# Altium schematic symbol library WR-TBL_Pluggable Connector.SchLib: 879 symbols (part 9 of 15)
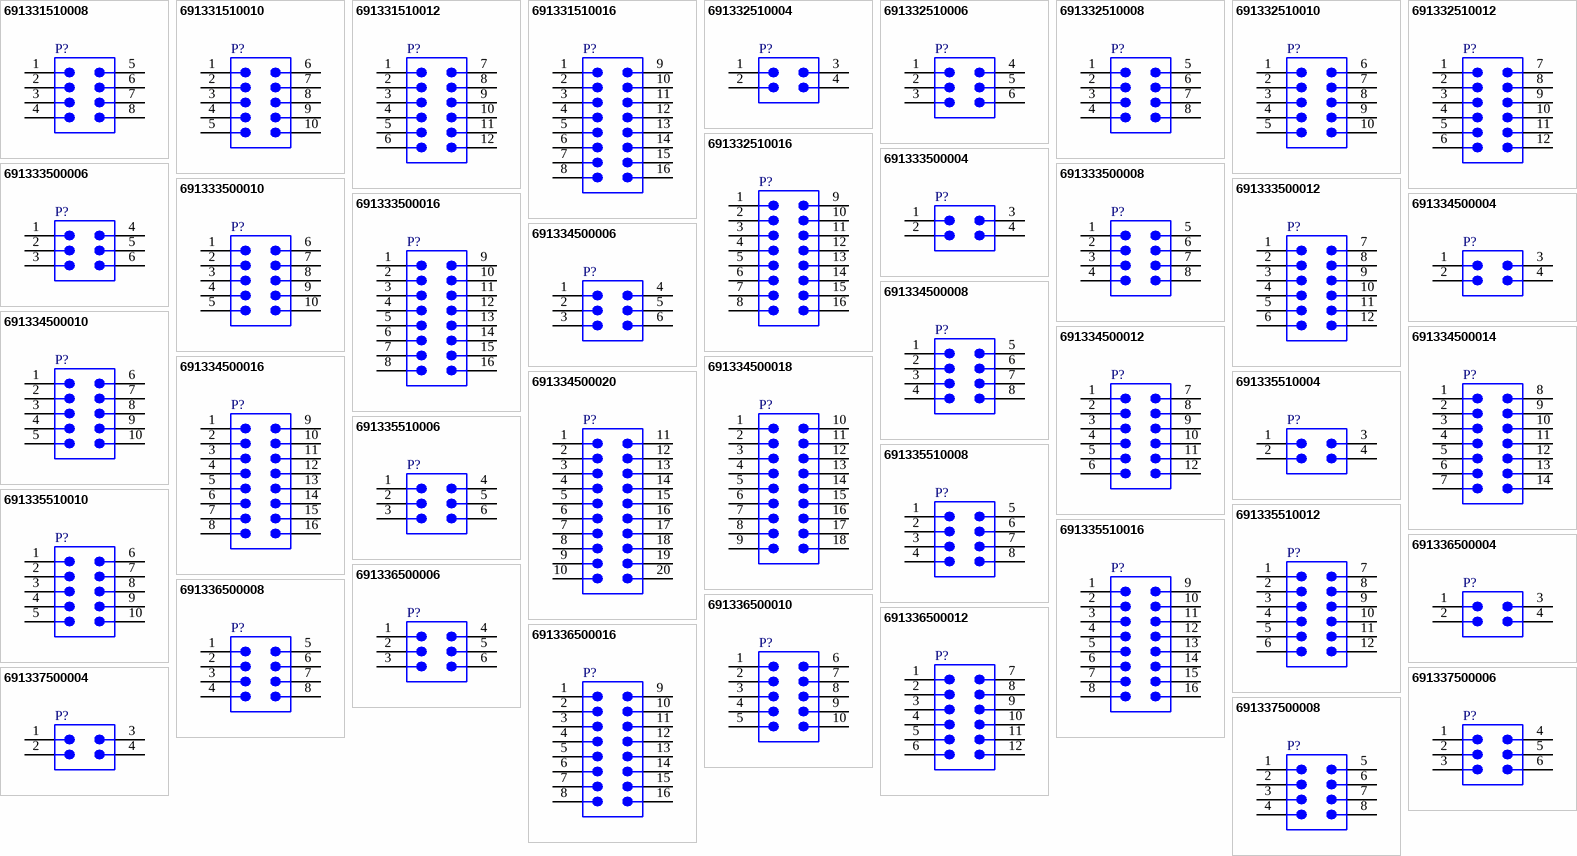
[diagram p29: symbols 691331510008 to 691337500008]

## 691335510012
designator P?  (value not drawn)
WR-TBL Series 3355 Double Level Horizontal PCB Header Modular, THT, pitch 5.08mm, 12p; Manufacturer: Wurth Elektronik; Modularity: Yes; Rated Current: 10A; Working Voltage: 300V (AC); Manufacturer Part Number: 691335510012; Product Series: WR-TBL; ComponentLink1Description: Website Link; ComponentLink1URL: https://www.we-online.com; ComponentLink2Description: Datasheet Link; ComponentLink2URL: https://www.we-online.com/components/products/datasheet/691335510012; Mount: Through Hole; Operating Temperature Min: -40degC; Operating Temperature Max: 105degC; Packaging: Box; Application: Pluggable; Number of Pins: 12; Number of Rows: 2; Orientation: Double Level Horizontal; Lead Pitch: 5.08mm
footprint 691335510012
pins: 1, 2, 3, 4, 5, 6, 7, 8, 9, 10, 11, 12

## 691335510016
designator P?  (value not drawn)
WR-TBL Series 3355 Double Level Horizontal PCB Header Modular, THT, pitch 5.08mm, 16p; Manufacturer: Wurth Elektronik; Modularity: Yes; Rated Current: 10A; Working Voltage: 300V (AC); Manufacturer Part Number: 691335510016; Product Series: WR-TBL; ComponentLink1Description: Website Link; ComponentLink1URL: https://www.we-online.com; ComponentLink2Description: Datasheet Link; ComponentLink2URL: https://www.we-online.com/components/products/datasheet/691335510016; Mount: Through Hole; Operating Temperature Min: -40degC; Operating Temperature Max: 105degC; Packaging: Box; Application: Pluggable; Number of Pins: 16; Number of Rows: 2; Orientation: Double Level Horizontal; Lead Pitch: 5.08mm
footprint 691335510016
pins: 1, 2, 3, 4, 5, 6, 7, 8, 9, 10, 11, 12, 13, 14, 15, 16

## 691336500004
designator P?  (value not drawn)
WR-TBL Series 3365 Double Level Vertical Header with Flanges, THT, pitch 5.08mm, 04p; Manufacturer: Wurth Elektronik; Modularity: No; Rated Current: 15A; Working Voltage: 300V (AC); Manufacturer Part Number: 691336500004; Product Series: WR-TBL; ComponentLink1Description: Website Link; ComponentLink1URL: https://www.we-online.com; ComponentLink2Description: Datasheet Link; ComponentLink2URL: https://www.we-online.com/components/products/datasheet/691336500004; Mount: Through Hole; Operating Temperature Min: -40degC; Operating Temperature Max: 105degC; Packaging: Box; Application: Pluggable; Number of Pins: 4; Number of Rows: 2; Orientation: Double Level Vertical; Lead Pitch: 5.08mm
footprint 691336500004
pins: 1, 2, 3, 4

## 691336500006
designator P?  (value not drawn)
WR-TBL Series 3365 Double Level Vertical Header with Flanges, THT, pitch 5.08mm, 06p; Manufacturer: Wurth Elektronik; Modularity: No; Rated Current: 15A; Working Voltage: 300V (AC); Manufacturer Part Number: 691336500006; Product Series: WR-TBL; ComponentLink1Description: Website Link; ComponentLink1URL: https://www.we-online.com; ComponentLink2Description: Datasheet Link; ComponentLink2URL: https://www.we-online.com/components/products/datasheet/691336500006; Mount: Through Hole; Operating Temperature Min: -40degC; Operating Temperature Max: 105degC; Packaging: Box; Application: Pluggable; Number of Pins: 6; Number of Rows: 2; Orientation: Double Level Vertical; Lead Pitch: 5.08mm
footprint 691336500006
pins: 1, 2, 3, 4, 5, 6

## 691336500008
designator P?  (value not drawn)
WR-TBL Series 3365 Double Level Vertical Header with Flanges, THT, pitch 5.08mm, 08p; Manufacturer: Wurth Elektronik; Modularity: No; Rated Current: 15A; Working Voltage: 300V (AC); Manufacturer Part Number: 691336500008; Product Series: WR-TBL; ComponentLink1Description: Website Link; ComponentLink1URL: https://www.we-online.com; ComponentLink2Description: Datasheet Link; ComponentLink2URL: https://www.we-online.com/components/products/datasheet/691336500008; Mount: Through Hole; Operating Temperature Min: -40degC; Operating Temperature Max: 105degC; Packaging: Box; Application: Pluggable; Number of Pins: 8; Number of Rows: 2; Orientation: Double Level Vertical; Lead Pitch: 5.08mm
footprint 691336500008
pins: 1, 2, 3, 4, 5, 6, 7, 8

## 691336500010
designator P?  (value not drawn)
WR-TBL Series 3365 Double Level Vertical Header with Flanges, THT, pitch 5.08mm, 10p; Manufacturer: Wurth Elektronik; Modularity: No; Rated Current: 15A; Working Voltage: 300V (AC); Manufacturer Part Number: 691336500010; Product Series: WR-TBL; ComponentLink1Description: Website Link; ComponentLink1URL: https://www.we-online.com; ComponentLink2Description: Datasheet Link; ComponentLink2URL: https://www.we-online.com/components/products/datasheet/691336500010; Mount: Through Hole; Operating Temperature Min: -40degC; Operating Temperature Max: 105degC; Packaging: Box; Application: Pluggable; Number of Pins: 10; Number of Rows: 2; Orientation: Double Level Vertical; Lead Pitch: 5.08mm
footprint 691336500010
pins: 1, 2, 3, 4, 5, 6, 7, 8, 9, 10

## 691336500012
designator P?  (value not drawn)
WR-TBL Series 3365 Double Level Vertical Header with Flanges, THT, pitch 5.08mm, 12p; Manufacturer: Wurth Elektronik; Modularity: No; Rated Current: 15A; Working Voltage: 300V (AC); Manufacturer Part Number: 691336500012; Product Series: WR-TBL; ComponentLink1Description: Website Link; ComponentLink1URL: https://www.we-online.com; ComponentLink2Description: Datasheet Link; ComponentLink2URL: https://www.we-online.com/components/products/datasheet/691336500012; Mount: Through Hole; Operating Temperature Min: -40degC; Operating Temperature Max: 105degC; Packaging: Box; Application: Pluggable; Number of Pins: 12; Number of Rows: 2; Orientation: Double Level Vertical; Lead Pitch: 5.08mm
footprint 691336500012
pins: 1, 2, 3, 4, 5, 6, 7, 8, 9, 10, 11, 12

## 691336500016
designator P?  (value not drawn)
WR-TBL Series 3365 Double Level Vertical Header with Flanges, THT, pitch 5.08mm, 16p; Manufacturer: Wurth Elektronik; Modularity: No; Rated Current: 15A; Working Voltage: 300V (AC); Manufacturer Part Number: 691336500016; Product Series: WR-TBL; ComponentLink1Description: Website Link; ComponentLink1URL: https://www.we-online.com; ComponentLink2Description: Datasheet Link; ComponentLink2URL: https://www.we-online.com/components/products/datasheet/691336500016; Mount: Through Hole; Operating Temperature Min: -40degC; Operating Temperature Max: 105degC; Packaging: Box; Application: Pluggable; Number of Pins: 16; Number of Rows: 2; Orientation: Double Level Vertical; Lead Pitch: 5.08mm
footprint 691336500016
pins: 1, 2, 3, 4, 5, 6, 7, 8, 9, 10, 11, 12, 13, 14, 15, 16

## 691337500004
designator P?  (value not drawn)
WR-TBL Series 3375 Double Level Vertical PCB Header with Flanges & Nut Type, THT, pitch 5.08mm, 04p; Manufacturer: Wurth Elektronik; Modularity: No; Rated Current: 10A; Working Voltage: 300V (AC); Manufacturer Part Number: 691337500004; Product Series: WR-TBL; ComponentLink1Description: Website Link; ComponentLink1URL: https://www.we-online.com; ComponentLink2Description: Datasheet Link; ComponentLink2URL: https://www.we-online.com/components/products/datasheet/691337500004; Mount: Through Hole; Operating Temperature Min: -40degC; Operating Temperature Max: 105degC; Packaging: Box; Application: Pluggable; Number of Pins: 4; Number of Rows: 2; Orientation: Double Level Vertical; Lead Pitch: 5.08mm
footprint 691337500004
pins: 1, 2, 3, 4

## 691337500006
designator P?  (value not drawn)
WR-TBL Series 3375 Double Level Vertical PCB Header with Flanges & Nut Type, THT, pitch 5.08mm, 06p; Manufacturer: Wurth Elektronik; Modularity: No; Rated Current: 10A; Working Voltage: 300V (AC); Manufacturer Part Number: 691337500006; Product Series: WR-TBL; ComponentLink1Description: Website Link; ComponentLink1URL: https://www.we-online.com; ComponentLink2Description: Datasheet Link; ComponentLink2URL: https://www.we-online.com/components/products/datasheet/691337500006; Mount: Through Hole; Operating Temperature Min: -40degC; Operating Temperature Max: 105degC; Packaging: Box; Application: Pluggable; Number of Pins: 6; Number of Rows: 2; Orientation: Double Level Vertical; Lead Pitch: 5.08mm
footprint 691337500006
pins: 1, 2, 3, 4, 5, 6

## 691337500008
designator P?  (value not drawn)
WR-TBL Series 3375 Double Level Vertical PCB Header with Flanges & Nut Type, THT, pitch 5.08mm, 08p; Manufacturer: Wurth Elektronik; Modularity: No; Rated Current: 10A; Working Voltage: 300V (AC); Manufacturer Part Number: 691337500008; Product Series: WR-TBL; ComponentLink1Description: Website Link; ComponentLink1URL: https://www.we-online.com; ComponentLink2Description: Datasheet Link; ComponentLink2URL: https://www.we-online.com/components/products/datasheet/691337500008; Mount: Through Hole; Operating Temperature Min: -40degC; Operating Temperature Max: 105degC; Packaging: Box; Application: Pluggable; Number of Pins: 8; Number of Rows: 2; Orientation: Double Level Vertical; Lead Pitch: 5.08mm
footprint 691337500008
pins: 1, 2, 3, 4, 5, 6, 7, 8

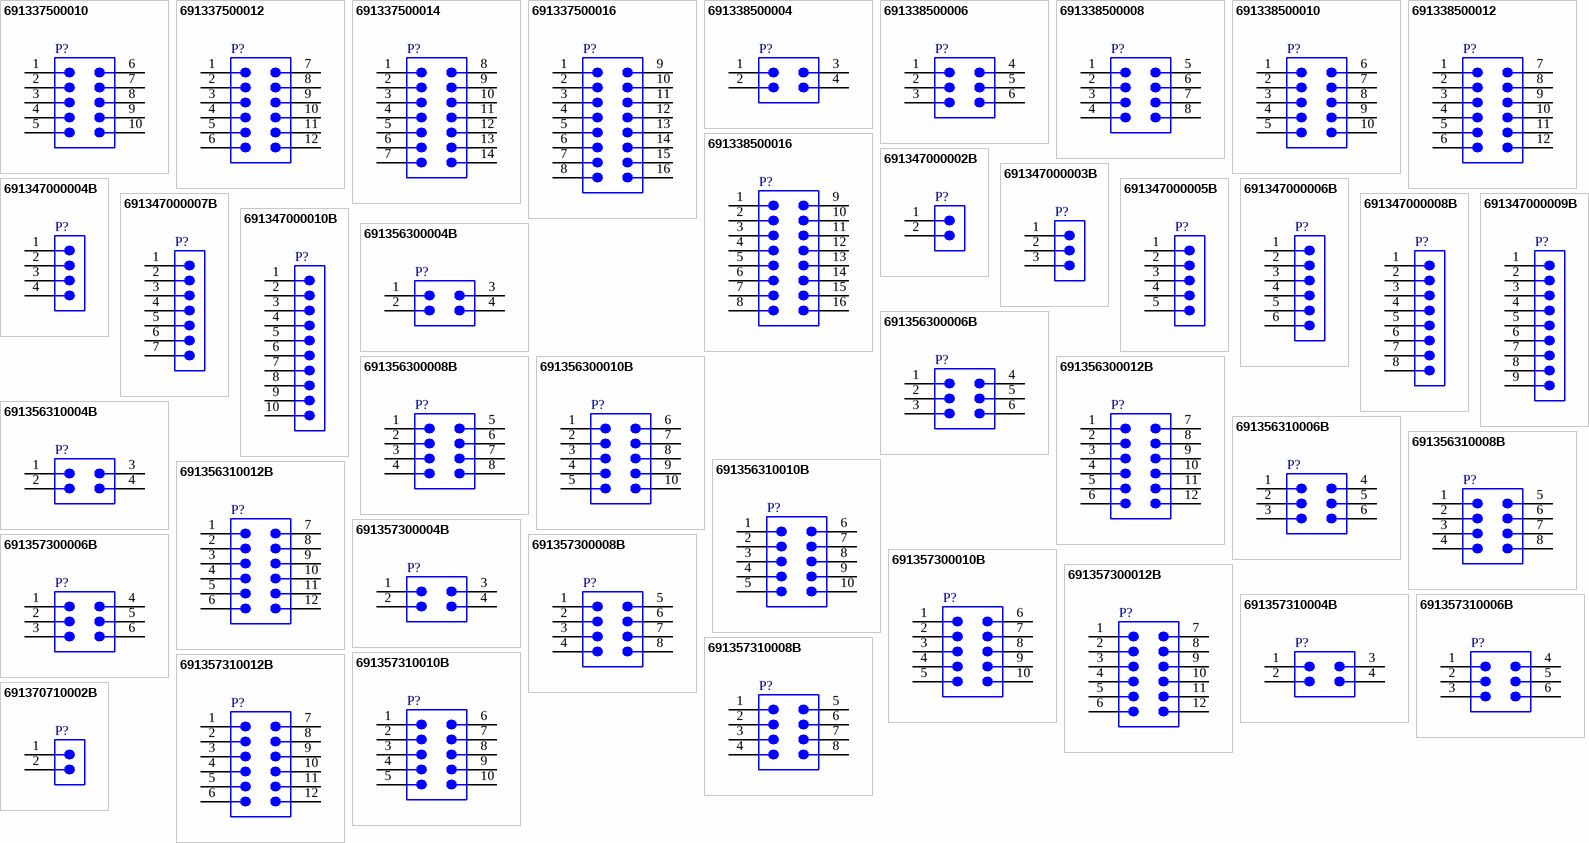
[diagram p13: symbols 691337500010 to 691370710002B]

## 691337500010
designator P?  (value not drawn)
WR-TBL Series 3375 Double Level Vertical PCB Header with Flanges & Nut Type, THT, pitch 5.08mm, 10p; Manufacturer: Wurth Elektronik; Modularity: No; Rated Current: 10A; Working Voltage: 300V (AC); Manufacturer Part Number: 691337500010; Product Series: WR-TBL; ComponentLink1Description: Website Link; ComponentLink1URL: https://www.we-online.com; ComponentLink2Description: Datasheet Link; ComponentLink2URL: https://www.we-online.com/components/products/datasheet/691337500010; Mount: Through Hole; Operating Temperature Min: -40degC; Operating Temperature Max: 105degC; Packaging: Box; Application: Pluggable; Number of Pins: 10; Number of Rows: 2; Orientation: Double Level Vertical; Lead Pitch: 5.08mm
footprint 691337500010
pins: 1, 2, 3, 4, 5, 6, 7, 8, 9, 10

## 691337500012
designator P?  (value not drawn)
WR-TBL Series 3375 Double Level Vertical PCB Header with Flanges & Nut Type, THT, pitch 5.08mm, 12p; Manufacturer: Wurth Elektronik; Modularity: No; Rated Current: 10A; Working Voltage: 300V (AC); Manufacturer Part Number: 691337500012; Product Series: WR-TBL; ComponentLink1Description: Website Link; ComponentLink1URL: https://www.we-online.com; ComponentLink2Description: Datasheet Link; ComponentLink2URL: https://www.we-online.com/components/products/datasheet/691337500012; Mount: Through Hole; Operating Temperature Min: -40degC; Operating Temperature Max: 105degC; Packaging: Box; Application: Pluggable; Number of Pins: 12; Number of Rows: 2; Orientation: Double Level Vertical; Lead Pitch: 5.08mm
footprint 691337500012
pins: 1, 2, 3, 4, 5, 6, 7, 8, 9, 10, 11, 12

## 691337500014
designator P?  (value not drawn)
WR-TBL Series 3375 Double Level Vertical PCB Header with Flanges & Nut Type, THT, pitch 5.08mm, 14p; Manufacturer: Wurth Elektronik; Modularity: No; Rated Current: 10A; Working Voltage: 300V (AC); Manufacturer Part Number: 691337500014; Product Series: WR-TBL; ComponentLink1Description: Website Link; ComponentLink1URL: https://www.we-online.com; ComponentLink2Description: Datasheet Link; ComponentLink2URL: https://www.we-online.com/components/products/datasheet/691337500014; Mount: Through Hole; Operating Temperature Min: -40degC; Operating Temperature Max: 105degC; Packaging: Box; Application: Pluggable; Number of Pins: 14; Number of Rows: 2; Orientation: Double Level Vertical; Lead Pitch: 5.08mm
footprint 691337500014
pins: 1, 2, 3, 4, 5, 6, 7, 8, 9, 10, 11, 12, 13, 14

## 691337500016
designator P?  (value not drawn)
WR-TBL Series 3375 Double Level Vertical PCB Header with Flanges & Nut Type, THT, pitch 5.08mm, 16p; Manufacturer: Wurth Elektronik; Modularity: No; Rated Current: 10A; Working Voltage: 300V (AC); Manufacturer Part Number: 691337500016; Product Series: WR-TBL; ComponentLink1Description: Website Link; ComponentLink1URL: https://www.we-online.com; ComponentLink2Description: Datasheet Link; ComponentLink2URL: https://www.we-online.com/components/products/datasheet/691337500016; Mount: Through Hole; Operating Temperature Min: -40degC; Operating Temperature Max: 105degC; Packaging: Box; Application: Pluggable; Number of Pins: 16; Number of Rows: 2; Orientation: Double Level Vertical; Lead Pitch: 5.08mm
footprint 691337500016
pins: 1, 2, 3, 4, 5, 6, 7, 8, 9, 10, 11, 12, 13, 14, 15, 16

## 691338500004
designator P?  (value not drawn)
WR-TBL Series 3385 Double Level Vertical PCB Header, THT, pitch 5.08mm, 04p; Manufacturer: Wurth Elektronik; Modularity: No; Rated Current: 15A; Working Voltage: 300V (AC); Manufacturer Part Number: 691338500004; Product Series: WR-TBL; ComponentLink1Description: Website Link; ComponentLink1URL: https://www.we-online.com; ComponentLink2Description: Datasheet Link; ComponentLink2URL: https://www.we-online.com/components/products/datasheet/691338500004; Mount: Through Hole; Operating Temperature Min: -40degC; Operating Temperature Max: 105degC; Packaging: Box; Application: Pluggable; Number of Pins: 4; Number of Rows: 2; Orientation: Double Level Vertical; Lead Pitch: 5.08mm
footprint 691338500004
pins: 1, 2, 3, 4

## 691338500006
designator P?  (value not drawn)
WR-TBL Series 3385 Double Level Vertical PCB Header, THT, pitch 5.08mm, 06p; Manufacturer: Wurth Elektronik; Modularity: No; Rated Current: 15A; Working Voltage: 300V (AC); Manufacturer Part Number: 691338500006; Product Series: WR-TBL; ComponentLink1Description: Website Link; ComponentLink1URL: https://www.we-online.com; ComponentLink2Description: Datasheet Link; ComponentLink2URL: https://www.we-online.com/components/products/datasheet/691338500006; Mount: Through Hole; Operating Temperature Min: -40degC; Operating Temperature Max: 105degC; Packaging: Box; Application: Pluggable; Number of Pins: 6; Number of Rows: 2; Orientation: Double Level Vertical; Lead Pitch: 5.08mm
footprint 691338500006
pins: 1, 2, 3, 4, 5, 6

## 691338500008
designator P?  (value not drawn)
WR-TBL Series 3385 Double Level Vertical PCB Header, THT, pitch 5.08mm, 08p; Manufacturer: Wurth Elektronik; Modularity: No; Rated Current: 15A; Working Voltage: 300V (AC); Manufacturer Part Number: 691338500008; Product Series: WR-TBL; ComponentLink1Description: Website Link; ComponentLink1URL: https://www.we-online.com; ComponentLink2Description: Datasheet Link; ComponentLink2URL: https://www.we-online.com/components/products/datasheet/691338500008; Mount: Through Hole; Operating Temperature Min: -40degC; Operating Temperature Max: 105degC; Packaging: Box; Application: Pluggable; Number of Pins: 8; Number of Rows: 2; Orientation: Double Level Vertical; Lead Pitch: 5.08mm
footprint 691338500008
pins: 1, 2, 3, 4, 5, 6, 7, 8

## 691338500010
designator P?  (value not drawn)
WR-TBL Series 3385 Double Level Vertical PCB Header, THT, pitch 5.08mm, 10p; Manufacturer: Wurth Elektronik; Modularity: No; Rated Current: 15A; Working Voltage: 300V (AC); Manufacturer Part Number: 691338500010; Product Series: WR-TBL; ComponentLink1Description: Website Link; ComponentLink1URL: https://www.we-online.com; ComponentLink2Description: Datasheet Link; ComponentLink2URL: https://www.we-online.com/components/products/datasheet/691338500010; Mount: Through Hole; Operating Temperature Min: -40degC; Operating Temperature Max: 105degC; Packaging: Box; Application: Pluggable; Number of Pins: 10; Number of Rows: 2; Orientation: Double Level Vertical; Lead Pitch: 5.08mm
footprint 691338500010
pins: 1, 2, 3, 4, 5, 6, 7, 8, 9, 10

## 691338500012
designator P?  (value not drawn)
WR-TBL Series 3385 Double Level Vertical PCB Header, THT, pitch 5.08mm, 12p; Manufacturer: Wurth Elektronik; Modularity: No; Rated Current: 15A; Working Voltage: 300V (AC); Manufacturer Part Number: 691338500012; Product Series: WR-TBL; ComponentLink1Description: Website Link; ComponentLink1URL: https://www.we-online.com; ComponentLink2Description: Datasheet Link; ComponentLink2URL: https://www.we-online.com/components/products/datasheet/691338500012; Mount: Through Hole; Operating Temperature Min: -40degC; Operating Temperature Max: 105degC; Packaging: Box; Application: Pluggable; Number of Pins: 12; Number of Rows: 2; Orientation: Double Level Vertical; Lead Pitch: 5.08mm
footprint 691338500012
pins: 1, 2, 3, 4, 5, 6, 7, 8, 9, 10, 11, 12

## 691338500016
designator P?  (value not drawn)
WR-TBL Series 3385 Double Level Vertical PCB Header, THT, pitch 5.08mm, 16p; Manufacturer: Wurth Elektronik; Modularity: No; Rated Current: 15A; Working Voltage: 300V (AC); Manufacturer Part Number: 691338500016; Product Series: WR-TBL; ComponentLink1Description: Website Link; ComponentLink1URL: https://www.we-online.com; ComponentLink2Description: Datasheet Link; ComponentLink2URL: https://www.we-online.com/components/products/datasheet/691338500016; Mount: Through Hole; Operating Temperature Min: -40degC; Operating Temperature Max: 105degC; Packaging: Box; Application: Pluggable; Number of Pins: 16; Number of Rows: 2; Orientation: Double Level Vertical; Lead Pitch: 5.08mm
footprint 691338500016
pins: 1, 2, 3, 4, 5, 6, 7, 8, 9, 10, 11, 12, 13, 14, 15, 16

## 691347000002B
designator P?  (value not drawn)
WR-TBL Series 3470B PCB Header Vertical cable entry, THT, pitch 2.5mm, 02p; Manufacturer: Wurth Elektronik; Modularity: No; Rated Current: 6A; Working Voltage: 150V (AC); Manufacturer Part Number: 691347000002B; Product Series: WR-TBL; ComponentLink1Description: Website Link; ComponentLink1URL: https://www.we-online.com; ComponentLink2Description: Datasheet Link; ComponentLink2URL: https://www.we-online.com/components/products/datasheet/691347000002B; Mount: Through Hole; Operating Temperature Min: -40degC; Operating Temperature Max: 105degC; Packaging: Carton; Application: Plug Screwless Push In; Number of Pins: 2; Number of Rows: 1; Orientation: Vertical Cable Entry; Lead Pitch: 2.5mm
footprint 691347000002B
pins: 1, 2

## 691347000003B
designator P?  (value not drawn)
WR-TBL Series 3470B PCB Header Vertical cable entry, THT, pitch 2.5mm, 03p; Manufacturer: Wurth Elektronik; Modularity: No; Rated Current: 6A; Working Voltage: 150V (AC); Manufacturer Part Number: 691347000003B; Product Series: WR-TBL; ComponentLink1Description: Website Link; ComponentLink1URL: https://www.we-online.com; ComponentLink2Description: Datasheet Link; ComponentLink2URL: https://www.we-online.com/components/products/datasheet/691347000003B; Mount: Through Hole; Operating Temperature Min: -40degC; Operating Temperature Max: 105degC; Packaging: Carton; Application: Plug Screwless Push In; Number of Pins: 3; Number of Rows: 1; Orientation: Vertical Cable Entry; Lead Pitch: 2.5mm
footprint 691347000003B
pins: 1, 2, 3

## 691347000004B
designator P?  (value not drawn)
WR-TBL Series 3470B PCB Header Vertical cable entry, THT, pitch 2.5mm, 04p; Manufacturer: Wurth Elektronik; Modularity: No; Rated Current: 6A; Working Voltage: 150V (AC); Manufacturer Part Number: 691347000004B; Product Series: WR-TBL; ComponentLink1Description: Website Link; ComponentLink1URL: https://www.we-online.com; ComponentLink2Description: Datasheet Link; ComponentLink2URL: https://www.we-online.com/components/products/datasheet/691347000004B; Mount: Through Hole; Operating Temperature Min: -40degC; Operating Temperature Max: 105degC; Packaging: Carton; Application: Plug Screwless Push In; Number of Pins: 4; Number of Rows: 1; Orientation: Vertical Cable Entry; Lead Pitch: 2.5mm
footprint 691347000004B
pins: 1, 2, 3, 4

## 691347000005B
designator P?  (value not drawn)
WR-TBL Series 3470B PCB Header Vertical cable entry, THT, pitch 2.5mm, 05p; Manufacturer: Wurth Elektronik; Modularity: No; Rated Current: 6A; Working Voltage: 150V (AC); Manufacturer Part Number: 691347000005B; Product Series: WR-TBL; ComponentLink1Description: Website Link; ComponentLink1URL: https://www.we-online.com; ComponentLink2Description: Datasheet Link; ComponentLink2URL: https://www.we-online.com/components/products/datasheet/691347000005B; Mount: Through Hole; Operating Temperature Min: -40degC; Operating Temperature Max: 105degC; Packaging: Carton; Application: Plug Screwless Push In; Number of Pins: 5; Number of Rows: 1; Orientation: Vertical Cable Entry; Lead Pitch: 2.5mm
footprint 691347000005B
pins: 1, 2, 3, 4, 5

## 691347000006B
designator P?  (value not drawn)
WR-TBL Series 3470B PCB Header Vertical cable entry, THT, pitch 2.5mm, 06p; Manufacturer: Wurth Elektronik; Modularity: No; Rated Current: 6A; Working Voltage: 150V (AC); Manufacturer Part Number: 691347000006B; Product Series: WR-TBL; ComponentLink1Description: Website Link; ComponentLink1URL: https://www.we-online.com; ComponentLink2Description: Datasheet Link; ComponentLink2URL: https://www.we-online.com/components/products/datasheet/691347000006B; Mount: Through Hole; Operating Temperature Min: -40degC; Operating Temperature Max: 105degC; Packaging: Carton; Application: Plug Screwless Push In; Number of Pins: 6; Number of Rows: 1; Orientation: Vertical Cable Entry; Lead Pitch: 2.5mm
footprint 691347000006B
pins: 1, 2, 3, 4, 5, 6

## 691347000007B
designator P?  (value not drawn)
WR-TBL Series 3470B PCB Header Vertical cable entry, THT, pitch 2.5mm, 07p; Manufacturer: Wurth Elektronik; Modularity: No; Rated Current: 6A; Working Voltage: 150V (AC); Manufacturer Part Number: 691347000007B; Product Series: WR-TBL; ComponentLink1Description: Website Link; ComponentLink1URL: https://www.we-online.com; ComponentLink2Description: Datasheet Link; ComponentLink2URL: https://www.we-online.com/components/products/datasheet/691347000007B; Mount: Through Hole; Operating Temperature Min: -40degC; Operating Temperature Max: 105degC; Packaging: Carton; Application: Plug Screwless Push In; Number of Pins: 7; Number of Rows: 1; Orientation: Vertical Cable Entry; Lead Pitch: 2.5mm
footprint 691347000007B
pins: 1, 2, 3, 4, 5, 6, 7

## 691347000008B
designator P?  (value not drawn)
WR-TBL Series 3470B PCB Header Vertical cable entry, THT, pitch 2.5mm, 08p; Manufacturer: Wurth Elektronik; Modularity: No; Rated Current: 6A; Working Voltage: 150V (AC); Manufacturer Part Number: 691347000008B; Product Series: WR-TBL; ComponentLink1Description: Website Link; ComponentLink1URL: https://www.we-online.com; ComponentLink2Description: Datasheet Link; ComponentLink2URL: https://www.we-online.com/components/products/datasheet/691347000008B; Mount: Through Hole; Operating Temperature Min: -40degC; Operating Temperature Max: 105degC; Packaging: Carton; Application: Plug Screwless Push In; Number of Pins: 8; Number of Rows: 1; Orientation: Vertical Cable Entry; Lead Pitch: 2.5mm
footprint 691347000008B
pins: 1, 2, 3, 4, 5, 6, 7, 8

## 691347000009B
designator P?  (value not drawn)
WR-TBL Series 3470B PCB Header Vertical cable entry, THT, pitch 2.5mm, 09p; Manufacturer: Wurth Elektronik; Modularity: No; Rated Current: 6A; Working Voltage: 150V (AC); Manufacturer Part Number: 691347000009B; Product Series: WR-TBL; ComponentLink1Description: Website Link; ComponentLink1URL: https://www.we-online.com; ComponentLink2Description: Datasheet Link; ComponentLink2URL: https://www.we-online.com/components/products/datasheet/691347000009B; Mount: Through Hole; Operating Temperature Min: -40degC; Operating Temperature Max: 105degC; Packaging: Carton; Application: Plug Screwless Push In; Number of Pins: 9; Number of Rows: 1; Orientation: Vertical Cable Entry; Lead Pitch: 2.5mm
footprint 691347000009B
pins: 1, 2, 3, 4, 5, 6, 7, 8, 9

## 691347000010B
designator P?  (value not drawn)
WR-TBL Series 3470B PCB Header Vertical cable entry, THT, pitch 2.5mm, 10p; Manufacturer: Wurth Elektronik; Modularity: No; Rated Current: 6A; Working Voltage: 150V (AC); Manufacturer Part Number: 691347000010B; Product Series: WR-TBL; ComponentLink1Description: Website Link; ComponentLink1URL: https://www.we-online.com; ComponentLink2Description: Datasheet Link; ComponentLink2URL: https://www.we-online.com/components/products/datasheet/691347000010B; Mount: Through Hole; Operating Temperature Min: -40degC; Operating Temperature Max: 105degC; Packaging: Carton; Application: Plug Screwless Push In; Number of Pins: 10; Number of Rows: 1; Orientation: Vertical Cable Entry; Lead Pitch: 2.5mm
footprint 691347000010B
pins: 1, 2, 3, 4, 5, 6, 7, 8, 9, 10

## 691356300004B
designator P?  (value not drawn)
WR-TBL Series 356B Double Level Vertical PCB Header, THT, pitch 3.81mm, 04p; Manufacturer: Wurth Elektronik; Modularity: No; Rated Current: 10A; Working Voltage: 300V (AC); Manufacturer Part Number: 691356300004B; Product Series: WR-TBL; ComponentLink1Description: Website Link; ComponentLink1URL: https://www.we-online.com; ComponentLink2Description: Datasheet Link; ComponentLink2URL: https://www.we-online.com/components/products/datasheet/691356300004B; Mount: Through Hole; Operating Temperature Min: -40degC; Operating Temperature Max: 105degC; Packaging: Box; Application: Pluggable; Number of Pins: 4; Number of Rows: 2; Orientation: Double Level Vertical; Lead Pitch: 3.81mm
footprint 691356300004B
pins: 1, 2, 3, 4

## 691356300006B
designator P?  (value not drawn)
WR-TBL Series 356B Double Level Vertical PCB Header, THT, pitch 3.81mm, 06p; Manufacturer: Wurth Elektronik; Modularity: No; Rated Current: 10A; Working Voltage: 300V (AC); Manufacturer Part Number: 691356300006B; Product Series: WR-TBL; ComponentLink1Description: Website Link; ComponentLink1URL: https://www.we-online.com; ComponentLink2Description: Datasheet Link; ComponentLink2URL: https://www.we-online.com/components/products/datasheet/691356300006B; Mount: Through Hole; Operating Temperature Min: -40degC; Operating Temperature Max: 105degC; Packaging: Box; Application: Pluggable; Number of Pins: 6; Number of Rows: 2; Orientation: Double Level Vertical; Lead Pitch: 3.81mm
footprint 691356300006B
pins: 1, 2, 3, 4, 5, 6

## 691356300008B
designator P?  (value not drawn)
WR-TBL Series 356B Double Level Vertical PCB Header, THT, pitch 3.81mm, 08p; Manufacturer: Wurth Elektronik; Modularity: No; Rated Current: 10A; Working Voltage: 300V (AC); Manufacturer Part Number: 691356300008B; Product Series: WR-TBL; ComponentLink1Description: Website Link; ComponentLink1URL: https://www.we-online.com; ComponentLink2Description: Datasheet Link; ComponentLink2URL: https://www.we-online.com/components/products/datasheet/691356300008B; Mount: Through Hole; Operating Temperature Min: -40degC; Operating Temperature Max: 105degC; Packaging: Box; Application: Pluggable; Number of Pins: 8; Number of Rows: 2; Orientation: Double Level Vertical; Lead Pitch: 3.81mm
footprint 691356300008B
pins: 1, 2, 3, 4, 5, 6, 7, 8

## 691356300010B
designator P?  (value not drawn)
WR-TBL Series 356B Double Level Vertical PCB Header, THT, pitch 3.81mm, 10p; Manufacturer: Wurth Elektronik; Modularity: No; Rated Current: 10A; Working Voltage: 300V (AC); Manufacturer Part Number: 691356300010B; Product Series: WR-TBL; ComponentLink1Description: Website Link; ComponentLink1URL: https://www.we-online.com; ComponentLink2Description: Datasheet Link; ComponentLink2URL: https://www.we-online.com/components/products/datasheet/691356300010B; Mount: Through Hole; Operating Temperature Min: -40degC; Operating Temperature Max: 105degC; Packaging: Box; Application: Pluggable; Number of Pins: 10; Number of Rows: 2; Orientation: Double Level Vertical; Lead Pitch: 3.81mm
footprint 691356300010B
pins: 1, 2, 3, 4, 5, 6, 7, 8, 9, 10

## 691356300012B
designator P?  (value not drawn)
WR-TBL Series 356B Double Level Vertical PCB Header, THT, pitch 3.81mm, 12p; Manufacturer: Wurth Elektronik; Modularity: No; Rated Current: 10A; Working Voltage: 300V (AC); Manufacturer Part Number: 691356300012B; Product Series: WR-TBL; ComponentLink1Description: Website Link; ComponentLink1URL: https://www.we-online.com; ComponentLink2Description: Datasheet Link; ComponentLink2URL: https://www.we-online.com/components/products/datasheet/691356300012B; Mount: Through Hole; Operating Temperature Min: -40degC; Operating Temperature Max: 105degC; Packaging: Box; Application: Pluggable; Number of Pins: 12; Number of Rows: 2; Orientation: Double Level Vertical; Lead Pitch: 3.81mm
footprint 691356300012B
pins: 1, 2, 3, 4, 5, 6, 7, 8, 9, 10, 11, 12

## 691356310004B
designator P?  (value not drawn)
WR-TBL Series 356B Double Level Horizontal PCB Header, THT, pitch 3.81mm, 04p; Manufacturer: Wurth Elektronik; Modularity: No; Rated Current: 10A; Working Voltage: 300V (AC); Manufacturer Part Number: 691356310004B; Product Series: WR-TBL; ComponentLink1Description: Website Link; ComponentLink1URL: https://www.we-online.com; ComponentLink2Description: Datasheet Link; ComponentLink2URL: https://www.we-online.com/components/products/datasheet/691356310004B; Mount: Through Hole; Operating Temperature Min: -40degC; Operating Temperature Max: 105degC; Packaging: Box; Application: Pluggable; Number of Pins: 4; Number of Rows: 2; Orientation: Double Level Horizontal; Lead Pitch: 3.81mm
footprint 691356310004B
pins: 1, 2, 3, 4

## 691356310006B
designator P?  (value not drawn)
WR-TBL Series 356B Double Level Horizontal PCB Header, THT, pitch 3.81mm, 06p; Manufacturer: Wurth Elektronik; Modularity: No; Rated Current: 10A; Working Voltage: 300V (AC); Manufacturer Part Number: 691356310006B; Product Series: WR-TBL; ComponentLink1Description: Website Link; ComponentLink1URL: https://www.we-online.com; ComponentLink2Description: Datasheet Link; ComponentLink2URL: https://www.we-online.com/components/products/datasheet/691356310006B; Mount: Through Hole; Operating Temperature Min: -40degC; Operating Temperature Max: 105degC; Packaging: Box; Application: Pluggable; Number of Pins: 6; Number of Rows: 2; Orientation: Double Level Horizontal; Lead Pitch: 3.81mm
footprint 691356310006B
pins: 1, 2, 3, 4, 5, 6

## 691356310008B
designator P?  (value not drawn)
WR-TBL Series 356B Double Level Horizontal PCB Header, THT, pitch 3.81mm, 08p; Manufacturer: Wurth Elektronik; Modularity: No; Rated Current: 10A; Working Voltage: 300V (AC); Manufacturer Part Number: 691356310008B; Product Series: WR-TBL; ComponentLink1Description: Website Link; ComponentLink1URL: https://www.we-online.com; ComponentLink2Description: Datasheet Link; ComponentLink2URL: https://www.we-online.com/components/products/datasheet/691356310008B; Mount: Through Hole; Operating Temperature Min: -40degC; Operating Temperature Max: 105degC; Packaging: Box; Application: Pluggable; Number of Pins: 8; Number of Rows: 2; Orientation: Double Level Horizontal; Lead Pitch: 3.81mm
footprint 691356310008B
pins: 1, 2, 3, 4, 5, 6, 7, 8

## 691356310010B
designator P?  (value not drawn)
WR-TBL Series 356B Double Level Horizontal PCB Header, THT, pitch 3.81mm, 10p; Manufacturer: Wurth Elektronik; Modularity: No; Rated Current: 10A; Working Voltage: 300V (AC); Manufacturer Part Number: 691356310010B; Product Series: WR-TBL; ComponentLink1Description: Website Link; ComponentLink1URL: https://www.we-online.com; ComponentLink2Description: Datasheet Link; ComponentLink2URL: https://www.we-online.com/components/products/datasheet/691356310010B; Mount: Through Hole; Operating Temperature Min: -40degC; Operating Temperature Max: 105degC; Packaging: Box; Application: Pluggable; Number of Pins: 10; Number of Rows: 2; Orientation: Double Level Horizontal; Lead Pitch: 3.81mm
footprint 691356310010B
pins: 1, 2, 3, 4, 5, 6, 7, 8, 9, 10

## 691356310012B
designator P?  (value not drawn)
WR-TBL Series 356B Double Level Horizontal PCB Header, THT, pitch 3.81mm, 12p; Manufacturer: Wurth Elektronik; Modularity: No; Rated Current: 10A; Working Voltage: 300V (AC); Manufacturer Part Number: 691356310012B; Product Series: WR-TBL; ComponentLink1Description: Website Link; ComponentLink1URL: https://www.we-online.com; ComponentLink2Description: Datasheet Link; ComponentLink2URL: https://www.we-online.com/components/products/datasheet/691356310012B; Mount: Through Hole; Operating Temperature Min: -40degC; Operating Temperature Max: 105degC; Packaging: Box; Application: Pluggable; Number of Pins: 12; Number of Rows: 2; Orientation: Double Level Horizontal; Lead Pitch: 3.81mm
footprint 691356310012B
pins: 1, 2, 3, 4, 5, 6, 7, 8, 9, 10, 11, 12

## 691357300004B
designator P?  (value not drawn)
WR-TBL Series 357B Double Level Vertical PCB Header with Flanges, THT, pitch 3.81mm, 04p; Manufacturer: Wurth Elektronik; Modularity: No; Rated Current: 10A; Working Voltage: 300V (AC); Manufacturer Part Number: 691357300004B; Product Series: WR-TBL; ComponentLink1Description: Website Link; ComponentLink1URL: https://www.we-online.com; ComponentLink2Description: Datasheet Link; ComponentLink2URL: https://www.we-online.com/components/products/datasheet/691357300004B; Mount: Through Hole; Operating Temperature Min: -40degC; Operating Temperature Max: 105degC; Packaging: Box; Application: Pluggable; Number of Pins: 4; Number of Rows: 2; Orientation: Double Level Vertical; Lead Pitch: 3.81mm
footprint 691357300004B
pins: 1, 2, 3, 4

## 691357300006B
designator P?  (value not drawn)
WR-TBL Series 357B Double Level Vertical PCB Header with Flanges, THT, pitch 3.81mm, 06p; Manufacturer: Wurth Elektronik; Modularity: No; Rated Current: 10A; Working Voltage: 300V (AC); Manufacturer Part Number: 691357300006B; Product Series: WR-TBL; ComponentLink1Description: Website Link; ComponentLink1URL: https://www.we-online.com; ComponentLink2Description: Datasheet Link; ComponentLink2URL: https://www.we-online.com/components/products/datasheet/691357300006B; Mount: Through Hole; Operating Temperature Min: -40degC; Operating Temperature Max: 105degC; Packaging: Box; Application: Pluggable; Number of Pins: 6; Number of Rows: 2; Orientation: Double Level Vertical; Lead Pitch: 3.81mm
footprint 691357300006B
pins: 1, 2, 3, 4, 5, 6

## 691357300008B
designator P?  (value not drawn)
WR-TBL Series 357B Double Level Vertical PCB Header with Flanges, THT, pitch 3.81mm, 08p; Manufacturer: Wurth Elektronik; Modularity: No; Rated Current: 10A; Working Voltage: 300V (AC); Manufacturer Part Number: 691357300008B; Product Series: WR-TBL; ComponentLink1Description: Website Link; ComponentLink1URL: https://www.we-online.com; ComponentLink2Description: Datasheet Link; ComponentLink2URL: https://www.we-online.com/components/products/datasheet/691357300008B; Mount: Through Hole; Operating Temperature Min: -40degC; Operating Temperature Max: 105degC; Packaging: Box; Application: Pluggable; Number of Pins: 8; Number of Rows: 2; Orientation: Double Level Vertical; Lead Pitch: 3.81mm
footprint 691357300008B
pins: 1, 2, 3, 4, 5, 6, 7, 8

## 691357300010B
designator P?  (value not drawn)
WR-TBL Series 357B Double Level Vertical PCB Header with Flanges, THT, pitch 3.81mm, 10p; Manufacturer: Wurth Elektronik; Modularity: No; Rated Current: 10A; Working Voltage: 300V (AC); Manufacturer Part Number: 691357300010B; Product Series: WR-TBL; ComponentLink1Description: Website Link; ComponentLink1URL: https://www.we-online.com; ComponentLink2Description: Datasheet Link; ComponentLink2URL: https://www.we-online.com/components/products/datasheet/691357300010B; Mount: Through Hole; Operating Temperature Min: -40degC; Operating Temperature Max: 105degC; Packaging: Box; Application: Pluggable; Number of Pins: 10; Number of Rows: 2; Orientation: Double Level Vertical; Lead Pitch: 3.81mm
footprint 691357300010B
pins: 1, 2, 3, 4, 5, 6, 7, 8, 9, 10

## 691357300012B
designator P?  (value not drawn)
WR-TBL Series 357B Double Level Vertical PCB Header with Flanges, THT, pitch 3.81mm, 12p; Manufacturer: Wurth Elektronik; Modularity: No; Rated Current: 10A; Working Voltage: 300V (AC); Manufacturer Part Number: 691357300012B; Product Series: WR-TBL; ComponentLink1Description: Website Link; ComponentLink1URL: https://www.we-online.com; ComponentLink2Description: Datasheet Link; ComponentLink2URL: https://www.we-online.com/components/products/datasheet/691357300012B; Mount: Through Hole; Operating Temperature Min: -40degC; Operating Temperature Max: 105degC; Packaging: Box; Application: Pluggable; Number of Pins: 12; Number of Rows: 2; Orientation: Double Level Vertical; Lead Pitch: 3.81mm
footprint 691357300012B
pins: 1, 2, 3, 4, 5, 6, 7, 8, 9, 10, 11, 12

## 691357310004B
designator P?  (value not drawn)
WR-TBL Series 357B Double Level Horizontal PCB Header with Flanges, THT, pitch 3.81mm, 04p; Manufacturer: Wurth Elektronik; Modularity: No; Rated Current: 10A; Working Voltage: 300V (AC); Manufacturer Part Number: 691357310004B; Product Series: WR-TBL; ComponentLink1Description: Website Link; ComponentLink1URL: https://www.we-online.com; ComponentLink2Description: Datasheet Link; ComponentLink2URL: https://www.we-online.com/components/products/datasheet/691357310004B; Mount: Through Hole; Operating Temperature Min: -40degC; Operating Temperature Max: 105degC; Packaging: Box; Application: Pluggable; Number of Pins: 4; Number of Rows: 2; Orientation: Double Level Horizontal; Lead Pitch: 3.81mm
footprint 691357310004B
pins: 1, 2, 3, 4

## 691357310006B
designator P?  (value not drawn)
WR-TBL Series 357B Double Level Horizontal PCB Header with Flanges, THT, pitch 3.81mm, 06p; Manufacturer: Wurth Elektronik; Modularity: No; Rated Current: 10A; Working Voltage: 300V (AC); Manufacturer Part Number: 691357310006B; Product Series: WR-TBL; ComponentLink1Description: Website Link; ComponentLink1URL: https://www.we-online.com; ComponentLink2Description: Datasheet Link; ComponentLink2URL: https://www.we-online.com/components/products/datasheet/691357310006B; Mount: Through Hole; Operating Temperature Min: -40degC; Operating Temperature Max: 105degC; Packaging: Box; Application: Pluggable; Number of Pins: 6; Number of Rows: 2; Orientation: Double Level Horizontal; Lead Pitch: 3.81mm
footprint 691357310006B
pins: 1, 2, 3, 4, 5, 6

## 691357310008B
designator P?  (value not drawn)
WR-TBL Series 357B Double Level Horizontal PCB Header with Flanges, THT, pitch 3.81mm, 08p; Manufacturer: Wurth Elektronik; Modularity: No; Rated Current: 10A; Working Voltage: 300V (AC); Manufacturer Part Number: 691357310008B; Product Series: WR-TBL; ComponentLink1Description: Website Link; ComponentLink1URL: https://www.we-online.com; ComponentLink2Description: Datasheet Link; ComponentLink2URL: https://www.we-online.com/components/products/datasheet/691357310008B; Mount: Through Hole; Operating Temperature Min: -40degC; Operating Temperature Max: 105degC; Packaging: Box; Application: Pluggable; Number of Pins: 8; Number of Rows: 2; Orientation: Double Level Horizontal; Lead Pitch: 3.81mm
footprint 691357310008B
pins: 1, 2, 3, 4, 5, 6, 7, 8

## 691357310010B
designator P?  (value not drawn)
WR-TBL Series 357B Double Level Horizontal PCB Header with Flanges, THT, pitch 3.81mm, 10p; Manufacturer: Wurth Elektronik; Modularity: No; Rated Current: 10A; Working Voltage: 300V (AC); Manufacturer Part Number: 691357310010B; Product Series: WR-TBL; ComponentLink1Description: Website Link; ComponentLink1URL: https://www.we-online.com; ComponentLink2Description: Datasheet Link; ComponentLink2URL: https://www.we-online.com/components/products/datasheet/691357310010B; Mount: Through Hole; Operating Temperature Min: -40degC; Operating Temperature Max: 105degC; Packaging: Box; Application: Pluggable; Number of Pins: 10; Number of Rows: 2; Orientation: Double Level Horizontal; Lead Pitch: 3.81mm
footprint 691357310010B
pins: 1, 2, 3, 4, 5, 6, 7, 8, 9, 10

## 691357310012B
designator P?  (value not drawn)
WR-TBL Series 357B Double Level Horizontal PCB Header with Flanges, THT, pitch 3.81mm, 12p; Manufacturer: Wurth Elektronik; Modularity: No; Rated Current: 10A; Working Voltage: 300V (AC); Manufacturer Part Number: 691357310012B; Product Series: WR-TBL; ComponentLink1Description: Website Link; ComponentLink1URL: https://www.we-online.com; ComponentLink2Description: Datasheet Link; ComponentLink2URL: https://www.we-online.com/components/products/datasheet/691357310012B; Mount: Through Hole; Operating Temperature Min: -40degC; Operating Temperature Max: 105degC; Packaging: Box; Application: Pluggable; Number of Pins: 12; Number of Rows: 2; Orientation: Double Level Horizontal; Lead Pitch: 3.81mm
footprint 691357310012B
pins: 1, 2, 3, 4, 5, 6, 7, 8, 9, 10, 11, 12

## 691370710002B
designator P?  (value not drawn)
WR-TBL Series 370B Horizontal PCB Header, THT, pitch 5mm, 02p; Manufacturer: Wurth Elektronik; Modularity: No; Rated Current: 16A; Working Voltage: 300V (AC); Manufacturer Part Number: 691370710002B; Product Series: WR-TBL; ComponentLink1Description: Website Link; ComponentLink1URL: https://www.we-online.com; ComponentLink2Description: Datasheet Link; ComponentLink2URL: https://www.we-online.com/components/products/datasheet/691370710002B; Mount: Through Hole; Operating Temperature Min: -40degC; Operating Temperature Max: 105degC; Packaging: Box; Application: Pluggable; Number of Pins: 2; Number of Rows: 1; Orientation: Horizontal; Lead Pitch: 5mm
footprint 691370710002B
pins: 1, 2

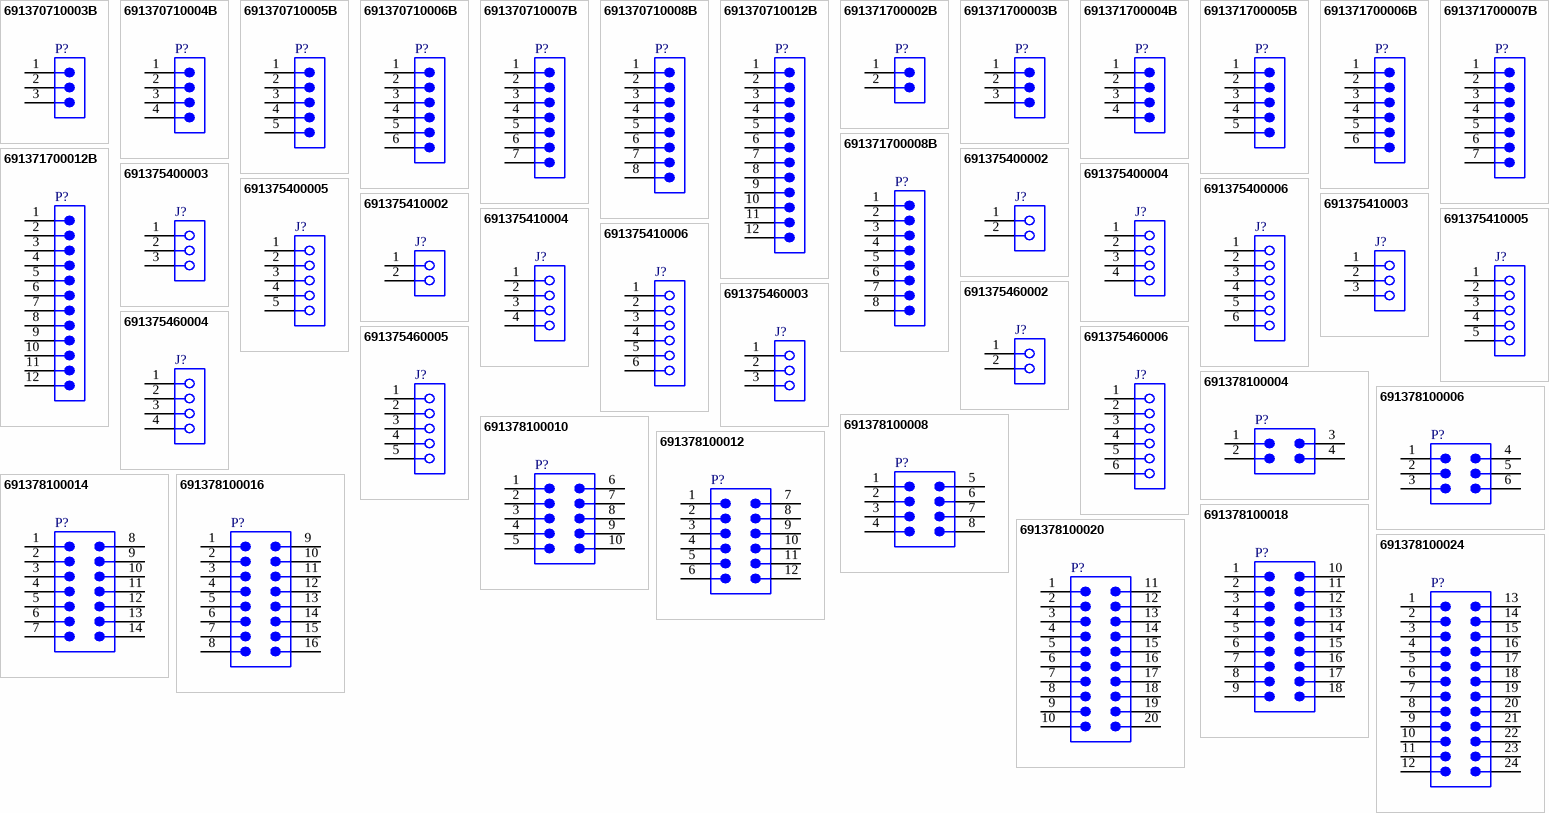
[diagram p14: symbols 691370710003B to 691378100024]

## 691370710003B
designator P?  (value not drawn)
WR-TBL Series 370B Horizontal PCB Header, THT, pitch 5mm, 03p; Manufacturer: Wurth Elektronik; Modularity: No; Rated Current: 16A; Working Voltage: 300V (AC); Manufacturer Part Number: 691370710003B; Product Series: WR-TBL; ComponentLink1Description: Website Link; ComponentLink1URL: https://www.we-online.com; ComponentLink2Description: Datasheet Link; ComponentLink2URL: https://www.we-online.com/components/products/datasheet/691370710003B; Mount: Through Hole; Operating Temperature Min: -40degC; Operating Temperature Max: 105degC; Packaging: Box; Application: Pluggable; Number of Pins: 3; Number of Rows: 1; Orientation: Horizontal; Lead Pitch: 5mm
footprint 691370710003B
pins: 1, 2, 3

## 691370710004B
designator P?  (value not drawn)
WR-TBL Series 370B Horizontal PCB Header, THT, pitch 5mm, 04p; Manufacturer: Wurth Elektronik; Modularity: No; Rated Current: 16A; Working Voltage: 300V (AC); Manufacturer Part Number: 691370710004B; Product Series: WR-TBL; ComponentLink1Description: Website Link; ComponentLink1URL: https://www.we-online.com; ComponentLink2Description: Datasheet Link; ComponentLink2URL: https://www.we-online.com/components/products/datasheet/691370710004B; Mount: Through Hole; Operating Temperature Min: -40degC; Operating Temperature Max: 105degC; Packaging: Box; Application: Pluggable; Number of Pins: 4; Number of Rows: 1; Orientation: Horizontal; Lead Pitch: 5mm
footprint 691370710004B
pins: 1, 2, 3, 4

## 691370710005B
designator P?  (value not drawn)
WR-TBL Series 370B Horizontal PCB Header, THT, pitch 5mm, 05p; Manufacturer: Wurth Elektronik; Modularity: No; Rated Current: 16A; Working Voltage: 300V (AC); Manufacturer Part Number: 691370710005B; Product Series: WR-TBL; ComponentLink1Description: Website Link; ComponentLink1URL: https://www.we-online.com; ComponentLink2Description: Datasheet Link; ComponentLink2URL: https://www.we-online.com/components/products/datasheet/691370710005B; Mount: Through Hole; Operating Temperature Min: -40degC; Operating Temperature Max: 105degC; Packaging: Box; Application: Pluggable; Number of Pins: 5; Number of Rows: 1; Orientation: Horizontal; Lead Pitch: 5mm
footprint 691370710005B
pins: 1, 2, 3, 4, 5

## 691370710006B
designator P?  (value not drawn)
WR-TBL Series 370B Horizontal PCB Header, THT, pitch 5mm, 06p; Manufacturer: Wurth Elektronik; Modularity: No; Rated Current: 16A; Working Voltage: 300V (AC); Manufacturer Part Number: 691370710006B; Product Series: WR-TBL; ComponentLink1Description: Website Link; ComponentLink1URL: https://www.we-online.com; ComponentLink2Description: Datasheet Link; ComponentLink2URL: https://www.we-online.com/components/products/datasheet/691370710006B; Mount: Through Hole; Operating Temperature Min: -40degC; Operating Temperature Max: 105degC; Packaging: Box; Application: Pluggable; Number of Pins: 6; Number of Rows: 1; Orientation: Horizontal; Lead Pitch: 5mm
footprint 691370710006B
pins: 1, 2, 3, 4, 5, 6

## 691370710007B
designator P?  (value not drawn)
WR-TBL Series 370B Horizontal PCB Header, THT, pitch 5mm, 07p; Manufacturer: Wurth Elektronik; Modularity: No; Rated Current: 16A; Working Voltage: 300V (AC); Manufacturer Part Number: 691370710007B; Product Series: WR-TBL; ComponentLink1Description: Website Link; ComponentLink1URL: https://www.we-online.com; ComponentLink2Description: Datasheet Link; ComponentLink2URL: https://www.we-online.com/components/products/datasheet/691370710007B; Mount: Through Hole; Operating Temperature Min: -40degC; Operating Temperature Max: 105degC; Packaging: Box; Application: Pluggable; Number of Pins: 7; Number of Rows: 1; Orientation: Horizontal; Lead Pitch: 5mm
footprint 691370710007B
pins: 1, 2, 3, 4, 5, 6, 7

## 691370710008B
designator P?  (value not drawn)
WR-TBL Series 370B Horizontal PCB Header, THT, pitch 5mm, 08p; Manufacturer: Wurth Elektronik; Modularity: No; Rated Current: 16A; Working Voltage: 300V (AC); Manufacturer Part Number: 691370710008B; Product Series: WR-TBL; ComponentLink1Description: Website Link; ComponentLink1URL: https://www.we-online.com; ComponentLink2Description: Datasheet Link; ComponentLink2URL: https://www.we-online.com/components/products/datasheet/691370710008B; Mount: Through Hole; Operating Temperature Min: -40degC; Operating Temperature Max: 105degC; Packaging: Box; Application: Pluggable; Number of Pins: 8; Number of Rows: 1; Orientation: Horizontal; Lead Pitch: 5mm
footprint 691370710008B
pins: 1, 2, 3, 4, 5, 6, 7, 8

## 691370710012B
designator P?  (value not drawn)
WR-TBL Series 370B Horizontal PCB Header, THT, pitch 5mm, 12p; Manufacturer: Wurth Elektronik; Modularity: No; Rated Current: 16A; Working Voltage: 300V (AC); Manufacturer Part Number: 691370710012B; Product Series: WR-TBL; ComponentLink1Description: Website Link; ComponentLink1URL: https://www.we-online.com; ComponentLink2Description: Datasheet Link; ComponentLink2URL: https://www.we-online.com/components/products/datasheet/691370710012B; Mount: Through Hole; Operating Temperature Min: -40degC; Operating Temperature Max: 105degC; Packaging: Box; Application: Pluggable; Number of Pins: 12; Number of Rows: 1; Orientation: Horizontal; Lead Pitch: 5mm
footprint 691370710012B
pins: 1, 2, 3, 4, 5, 6, 7, 8, 9, 10, 11, 12

## 691371700002B
designator P?  (value not drawn)
WR-TBL Series 371B Vertical PCB Header, THT, pitch 5mm, 02p; Manufacturer: Wurth Elektronik; Modularity: No; Rated Current: 16A; Working Voltage: 300V (AC); Manufacturer Part Number: 691371700002B; Product Series: WR-TBL; ComponentLink1Description: Website Link; ComponentLink1URL: https://www.we-online.com; ComponentLink2Description: Datasheet Link; ComponentLink2URL: https://www.we-online.com/components/products/datasheet/691371700002B; Mount: Through Hole; Operating Temperature Min: -40degC; Operating Temperature Max: 105degC; Packaging: Box; Application: Pluggable; Number of Pins: 2; Number of Rows: 1; Orientation: Vertical; Lead Pitch: 5mm
footprint 691371700002B
pins: 1, 2

## 691371700003B
designator P?  (value not drawn)
WR-TBL Series 371B Vertical PCB Header, THT, pitch 5mm, 03p; Manufacturer: Wurth Elektronik; Modularity: No; Rated Current: 16A; Working Voltage: 300V (AC); Manufacturer Part Number: 691371700003B; Product Series: WR-TBL; ComponentLink1Description: Website Link; ComponentLink1URL: https://www.we-online.com; ComponentLink2Description: Datasheet Link; ComponentLink2URL: https://www.we-online.com/components/products/datasheet/691371700003B; Mount: Through Hole; Operating Temperature Min: -40degC; Operating Temperature Max: 105degC; Packaging: Box; Application: Pluggable; Number of Pins: 3; Number of Rows: 1; Orientation: Vertical; Lead Pitch: 5mm
footprint 691371700003B
pins: 1, 2, 3

## 691371700004B
designator P?  (value not drawn)
WR-TBL Series 371B Vertical PCB Header, THT, pitch 5mm, 04p; Manufacturer: Wurth Elektronik; Modularity: No; Rated Current: 16A; Working Voltage: 300V (AC); Manufacturer Part Number: 691371700004B; Product Series: WR-TBL; ComponentLink1Description: Website Link; ComponentLink1URL: https://www.we-online.com; ComponentLink2Description: Datasheet Link; ComponentLink2URL: https://www.we-online.com/components/products/datasheet/691371700004B; Mount: Through Hole; Operating Temperature Min: -40degC; Operating Temperature Max: 105degC; Packaging: Box; Application: Pluggable; Number of Pins: 4; Number of Rows: 1; Orientation: Vertical; Lead Pitch: 5mm
footprint 691371700004B
pins: 1, 2, 3, 4

## 691371700005B
designator P?  (value not drawn)
WR-TBL Series 371B Vertical PCB Header, THT, pitch 5mm, 05p; Manufacturer: Wurth Elektronik; Modularity: No; Rated Current: 16A; Working Voltage: 300V (AC); Manufacturer Part Number: 691371700005B; Product Series: WR-TBL; ComponentLink1Description: Website Link; ComponentLink1URL: https://www.we-online.com; ComponentLink2Description: Datasheet Link; ComponentLink2URL: https://www.we-online.com/components/products/datasheet/691371700005B; Mount: Through Hole; Operating Temperature Min: -40degC; Operating Temperature Max: 105degC; Packaging: Box; Application: Pluggable; Number of Pins: 5; Number of Rows: 1; Orientation: Vertical; Lead Pitch: 5mm
footprint 691371700005B
pins: 1, 2, 3, 4, 5

## 691371700006B
designator P?  (value not drawn)
WR-TBL Series 371B Vertical PCB Header, THT, pitch 5mm, 06p; Manufacturer: Wurth Elektronik; Modularity: No; Rated Current: 16A; Working Voltage: 300V (AC); Manufacturer Part Number: 691371700006B; Product Series: WR-TBL; ComponentLink1Description: Website Link; ComponentLink1URL: https://www.we-online.com; ComponentLink2Description: Datasheet Link; ComponentLink2URL: https://www.we-online.com/components/products/datasheet/691371700006B; Mount: Through Hole; Operating Temperature Min: -40degC; Operating Temperature Max: 105degC; Packaging: Box; Application: Pluggable; Number of Pins: 6; Number of Rows: 1; Orientation: Vertical; Lead Pitch: 5mm
footprint 691371700006B
pins: 1, 2, 3, 4, 5, 6